# Altium integrated library Ali-padash.IntLib: 1012 symbols (part 5 of 5)

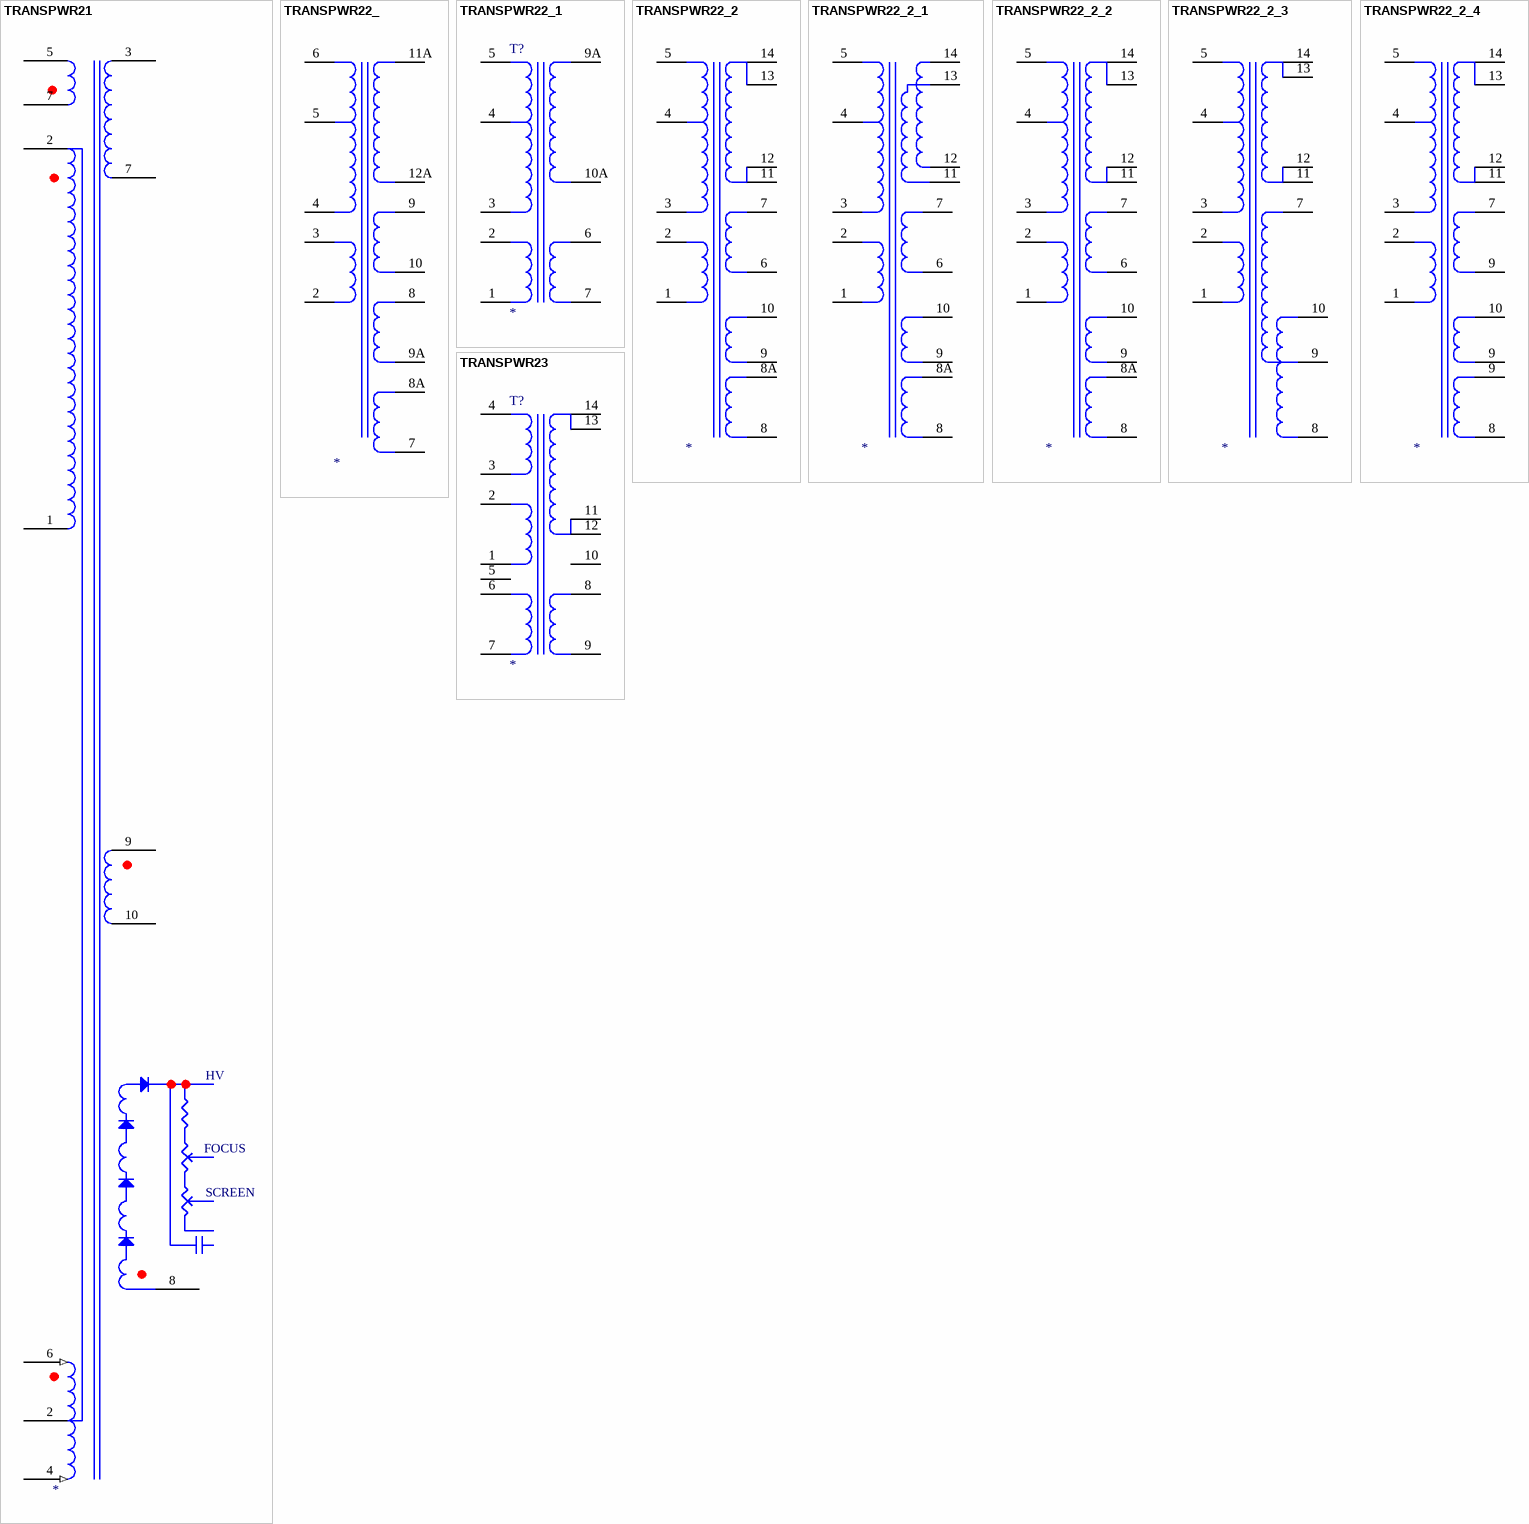
[diagram p72: symbols TRANSPWR21 to TRANSPWR23]

## TRANSPWR21
designator ?
pins: 1, 2, 2, 3, 4 (in), 5, 6 (in), 7, 7, 8, 9, 10
text: HV; FOCUS; SCREEN

## TRANSPWR22_
designator ?
pins: 2, 3, 4, 5 0, 6, 7, 8, 8A, 9, 9A, 10, 11A, 12A

## TRANSPWR22_1
designator T?
footprint EI3026B
pins: 1, 2, 3, 4, 5, 6, 7, 9A, 10A

## TRANSPWR22_2
designator ?
pins: 1, 2, 3, 4 0, 5, 6, 7, 8, 8A, 9, 10, 11, 12, 13, 14

## TRANSPWR22_2_1
designator ?
pins: 1, 2, 3, 4 0, 5, 6, 7, 8, 8A, 9, 10, 11, 12, 13, 14

## TRANSPWR22_2_2
designator ?
pins: 1, 2, 3, 4 0, 5, 6, 7, 8, 8A, 9, 10, 11, 12, 13, 14

## TRANSPWR22_2_3
designator ?
pins: 1, 2, 3, 4 0, 5, 7, 8, 9, 10, 11, 12, 13, 14

## TRANSPWR22_2_4
designator ?
pins: 1, 2, 3, 4 0, 5, 7, 8, 9, 9, 9, 10, 11, 12, 13, 14

## TRANSPWR23
designator T?
footprint TRANSPWR2
pins: 1, 2, 3 0, 4, 5, 6, 7, 8, 9, 10, 11, 12, 13, 14

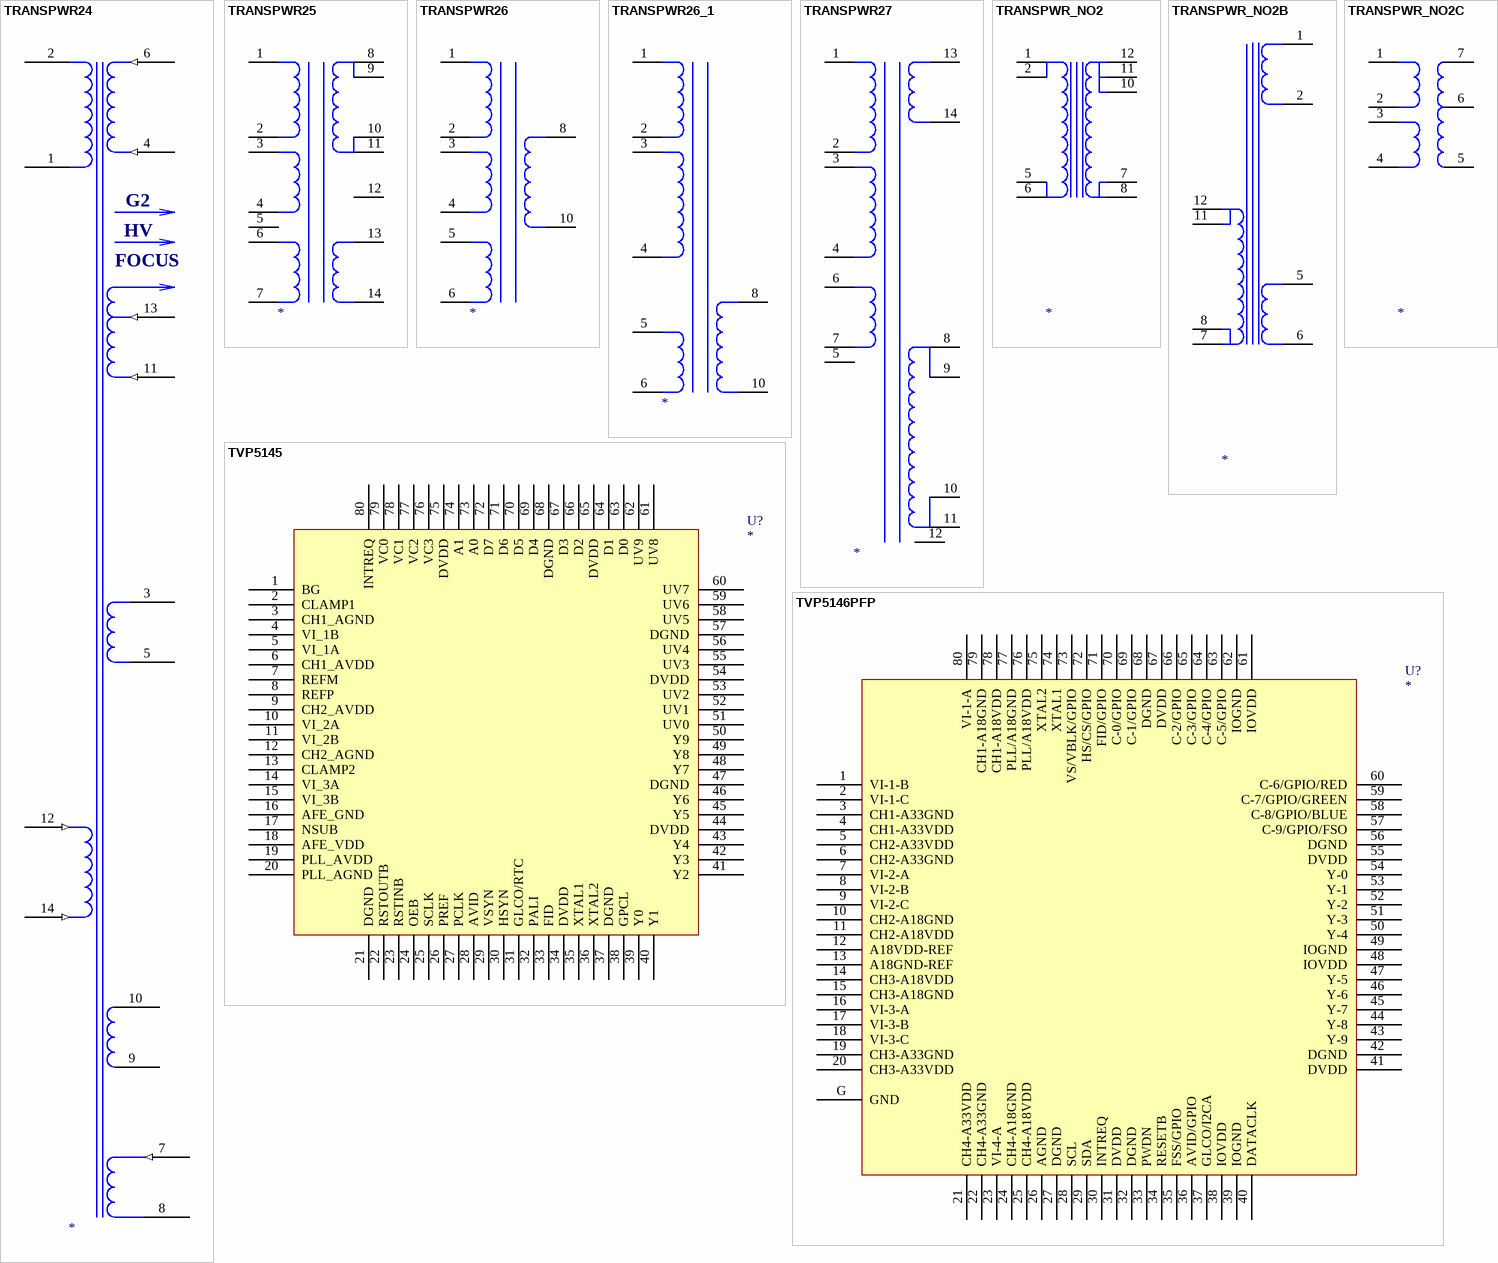
[diagram p73: symbols TRANSPWR24 to TVP5146PFP]

## TRANSPWR24
designator ?
pins: 1, 2, 3, 4 (in), 5, 6 (in), 7 (in), 8, 9, 10, 11 (in), 12 (in), 13 (in), 14 (in)
text: G2; HV; FOCUS

## TRANSPWR25
designator ?
pins: 1, 2, 3 0, 4, 5, 6, 7, 8, 9, 10, 11, 12, 13, 14

## TRANSPWR26
designator ?
pins: 1, 2, 3 0, 4, 5, 6, 8, 10

## TRANSPWR26_1
designator ?
pins: 1, 2, 3 0, 4, 5, 6, 8, 10

## TRANSPWR27
designator ?
pins: 1, 2, 3 0, 4, 5, 6, 7, 8, 9, 10, 11, 12, 13, 14

## TRANSPWR_NO2
designator ?
pins: 1, 2, 5, 6, 7, 8, 10, 11, 12

## TRANSPWR_NO2B
designator ?
pins: 1, 2, 5, 6, 7, 8, 11, 12

## TRANSPWR_NO2C
designator ?
pins: 1, 2, 3, 4, 5, 6, 7

## TVP5145
designator U?
footprint PQFP-G80
pins: 1 BG, 2 CLAMP1, 3 CH1_AGND, 4 VI_1B, 5 VI_1A, 6 CH1_AVDD, 7 REFM, 8 REFP, 9 CH2_AVDD, 10 VI_2A, 11 VI_2B, 12 CH2_AGND, 13 CLAMP2, 14 VI_3A, 15 VI_3B, 16 AFE_GND, 17 NSUB, 18 AFE_VDD, 19 PLL_AVDD, 20 PLL_AGND, 21 DGND, 22 RSTOUTB, 23 RSTINB, 24 OEB, 25 SCLK, 26 PREF, 27 PCLK, 28 AVID, 29 VSYN, 30 HSYN, 31 GLCO/RTC, 32 PALI, 33 FID, 34 DVDD, 35 XTAL1, 36 XTAL2, 37 DGND, 38 GPCL, 39 Y0, 40 Y1, 41 Y2, 42 Y3, 43 Y4, 44 DVDD, 45 Y5, 46 Y6, 47 DGND, 48 Y7, 49 Y8, 50 Y9, 51 UV0, 52 UV1, 53 UV2, 54 DVDD, 55 UV3, 56 UV4, 57 DGND, 58 UV5, 59 UV6, 60 UV7, 61 UV8, 62 UV9, 63 D0, 64 D1, 65 DVDD, 66 D2, 67 D3, 68 DGND, 69 D4, 70 D5, 71 D6, 72 D7, 73 A0, 74 A1, 75 DVDD, 76 VC3, 77 VC2, 78 VC1, 79 VC0, 80 INTREQ

## TVP5146PFP
designator U?
footprint PQFP-G80
pins: 1 VI-1-B, 2 VI-1-C, 3 CH1-A33GND, 4 CH1-A33VDD, 5 CH2-A33VDD, 6 CH2-A33GND, 7 VI-2-A, 8 VI-2-B, 9 VI-2-C, 10 CH2-A18GND, 11 CH2-A18VDD, 12 A18VDD-REF, 13 A18GND-REF, 14 CH3-A18VDD, 15 CH3-A18GND, 16 VI-3-A, 17 VI-3-B, 18 VI-3-C, 19 CH3-A33GND, 20 CH3-A33VDD, 21 CH4-A33VDD, 22 CH4-A33GND, 23 VI-4-A, 24 CH4-A18GND, 25 CH4-A18VDD, 26 AGND, 27 DGND, 28 SCL, 29 SDA, 30 INTREQ, 31 DVDD, 32 DGND, 33 PWDN, 34 RESETB, 35 FSS/GPIO, 36 AVID/GPIO, 37 GLCO/I2CA, 38 IOVDD, 39 IOGND, 40 DATACLK, 41 DVDD, 42 DGND, 43 Y-9, 44 Y-8, 45 Y-7, 46 Y-6, 47 Y-5, 48 IOVDD, 49 IOGND, 50 Y-4, 51 Y-3, 52 Y-2, 53 Y-1, 54 Y-0, 55 DVDD, 56 DGND, 57 C-9/GPIO/FSO, 58 C-8/GPIO/BLUE, 59 C-7/GPIO/GREEN, 60 C-6/GPIO/RED, 61 IOVDD, 62 IOGND, 63 C-5/GPIO, 64 C-4/GPIO, 65 C-3/GPIO, 66 C-2/GPIO, 67 DVDD, 68 DGND, 69 C-1/GPIO, 70 C-0/GPIO, 71 FID/GPIO, 72 HS/CS/GPIO, 73 VS/VBLK/GPIO, 74 XTAL1, 75 XTAL2, 76 PLL/A18VDD, 77 PLL/A18GND, 78 CH1-A18VDD, 79 CH1-A18GND, 80 VI-1-A, G GND

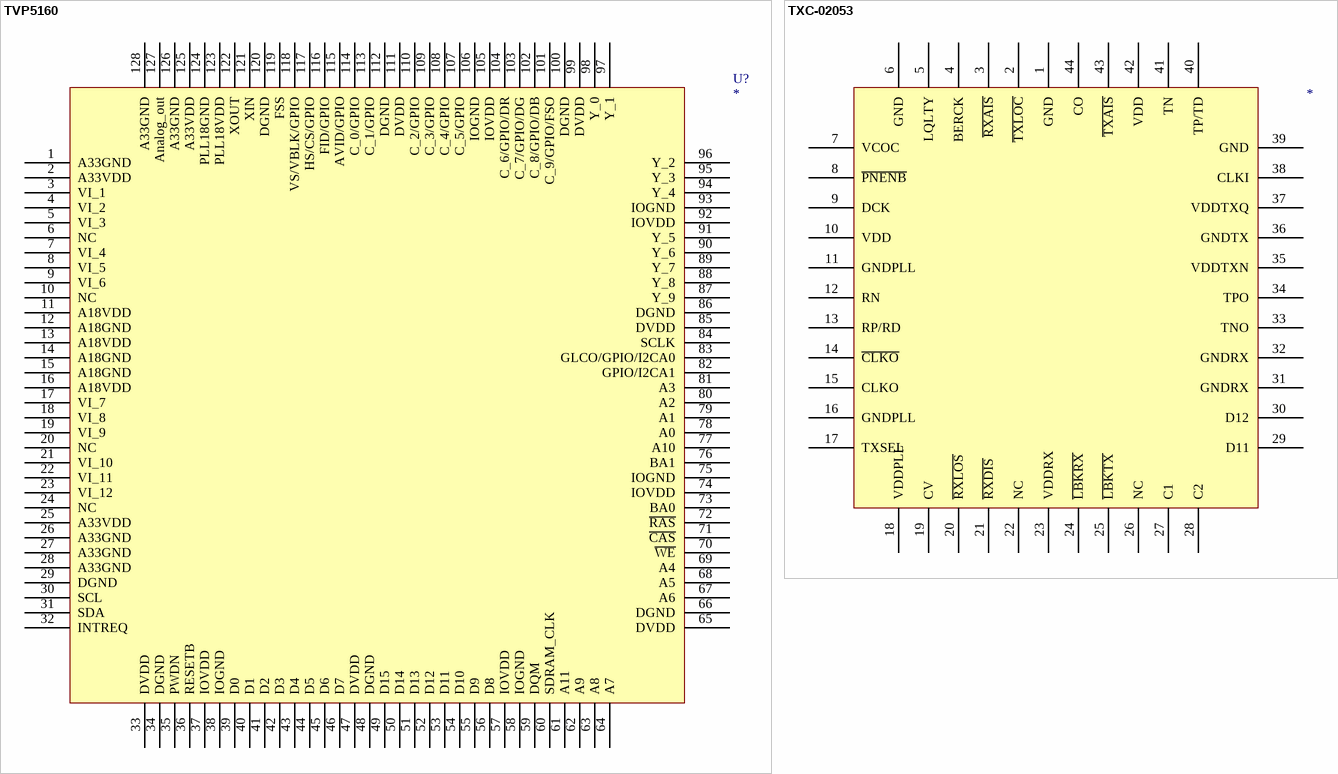
[diagram p74: symbols TVP5160 to TXC-02053]

## TVP5160
designator U?
footprint S-PQFP-G128
pins: 1 A33GND, 2 A33VDD, 3 VI_1, 4 VI_2, 5 VI_3, 6 NC, 7 VI_4, 8 VI_5, 9 VI_6, 10 NC, 11 A18VDD, 12 A18GND, 13 A18VDD, 14 A18GND, 15 A18GND, 16 A18VDD, 17 VI_7, 18 VI_8, 19 VI_9, 20 NC, 21 VI_10, 22 VI_11, 23 VI_12, 24 NC, 25 A33VDD, 26 A33GND, 27 A33GND, 28 A33GND, 29 DGND, 30 SCL, 31 SDA, 32 INTREQ, 33 DVDD, 34 DGND, 35 PWDN, 36 RESETB, 37 IOVDD, 38 IOGND, 39 D0, 40 D1, 41 D2, 42 D3, 43 D4, 44 D5, 45 D6, 46 D7, 47 DVDD, 48 DGND, 49 D15, 50 D14, 51 D13, 52 D12, 53 D11, 54 D10, 55 D9, 56 D8, 57 IOVDD, 58 IOGND, 59 DQM, 60 SDRAM_CLK, 61 A11, 62 A9, 63 A8, 64 A7, 65 DVDD, 66 DGND, 67 A6, 68 A5, 69 A4, 70 ~{WE}, 71 ~{CAS}, 72 ~{RAS}, 73 BA0, 74 IOVDD, 75 IOGND, 76 BA1, 77 A10, 78 A0, 79 A1, 80 A2, 81 A3, 82 GPIO/I2CA1, 83 GLCO/GPIO/I2CA0, 84 SCLK, 85 DVDD, 86 DGND, 87 Y_9, 88 Y_8, 89 Y_7, 90 Y_6, 91 Y_5, 92 IOVDD, 93 IOGND, 94 Y_4, 95 Y_3, 96 Y_2, 97 Y_1, 98 Y_0, 99 DVDD, 100 DGND, 101 C_9/GPIO/FSO, 102 C_8/GPIO/DB, 103 C_7/GPIO/DG, 104 C_6/GPIO/DR, 105 IOVDD, 106 IOGND, 107 C_5/GPIO, 108 C_4/GPIO, 109 C_3/GPIO, 110 C_2/GPIO, 111 DVDD, 112 DGND, 113 C_1/GPIO, 114 C_0/GPIO, 115 AVID/GPIO, 116 FID/GPIO, 117 HS/CS/GPIO, 118 VS/VBLK/GPIO, 119 FSS, 120 DGND, 121 XIN, 122 XOUT, 123 PLL18VDD, 124 PLL18GND, 125 A33VDD, 126 A33GND, 127 Analog_out, 128 A33GND

## TXC-02053
designator ?
U?
pins: 1 GND, 2 ~{TXLOC}, 3 ~{RXAIS}, 4 BERCK, 5 LQLTY, 6 GND, 7 VCOC, 8 ~{PNENB}, 9 DCK, 10 VDD, 11 GNDPLL, 12 RN, 13 RP/RD, 14 ~{CLKO}, 15 CLKO, 16 GNDPLL, 17 TXSEL, 18 VDDPLL, 19 CV, 20 ~{RXLOS}, 21 ~{RXDIS}, 22 NC, 23 VDDRX, 24 ~{LBKRX}, 25 ~{LBKTX}, 26 NC, 27 C1, 28 C2, 29 D11, 30 D12, 31 GNDRX, 32 GNDRX, 33 TNO, 34 TPO, 35 VDDTXN, 36 GNDTX, 37 VDDTXQ, 38 CLKI, 39 GND, 40 TP/TD, 41 TN, 42 VDD, 43 ~{TXAIS}, 44 CO

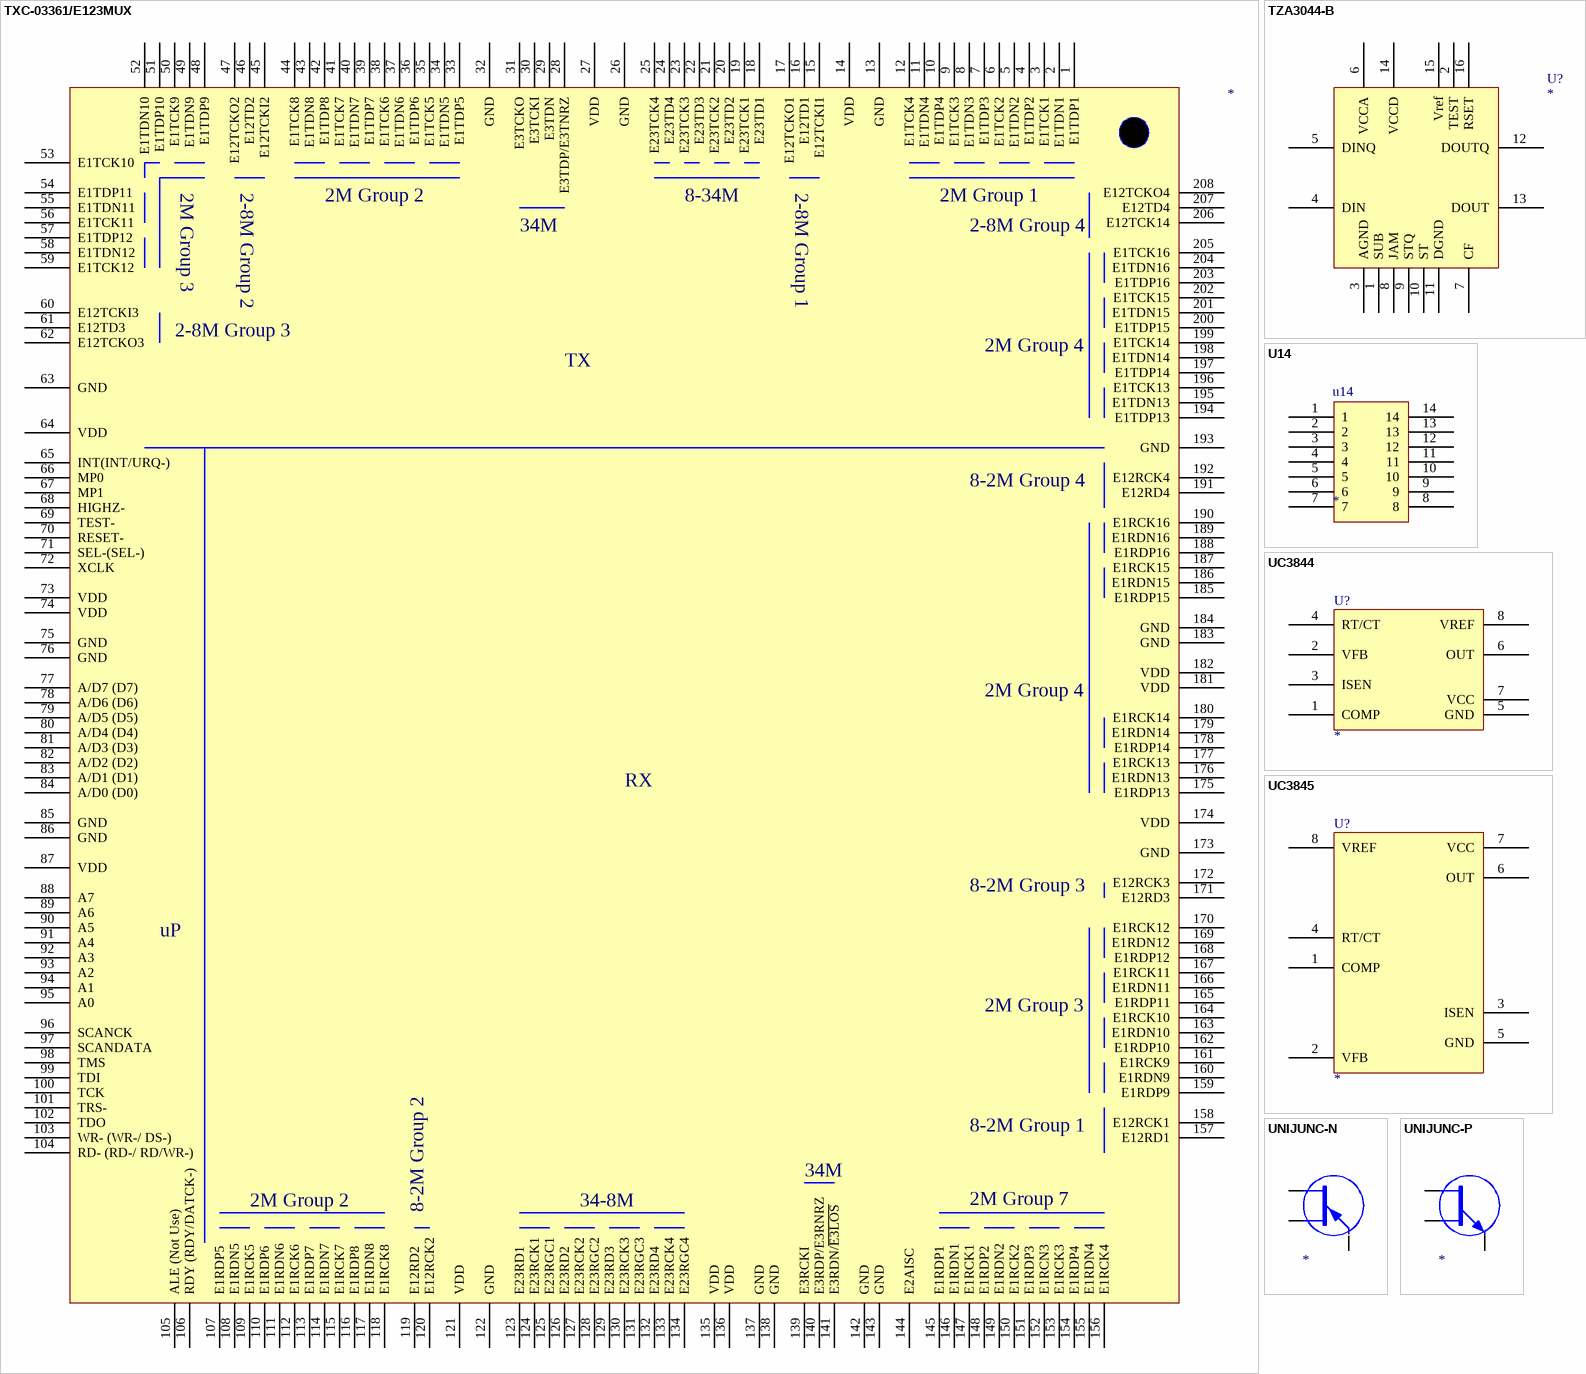
[diagram p75: symbols TXC-03361/E123MUX to UNIJUNC-P]

## TXC-03361/E123MUX
designator ?
U?
pins: 1 E1TDP1, 2 E1TDN1, 3 E1TCK1, 4 E1TDP2, 5 E1TDN2, 6 E1TCK2, 7 E1TDP3, 8 E1TDN3, 9 E1TCK3, 10 E1TDP4, 11 E1TDN4, 12 E1TCK4, 13 GND (power), 14 VDD (power), 15 E12TCKI1, 16 E12TD1, 17 E12TCKO1, 18 E23TD1, 19 E23TCK1, 20 E23TD2, 21 E23TCK2, 22 E23TD3, 23 E23TCK3, 24 E23TD4, 25 E23TCK4, 26 GND (power), 27 VDD (power), 28 E3TDP/E3TNRZ, 29 E3TDN, 30 E3TCKI, 31 E3TCKO, 32 GND (power), 33 E1TDP5, 34 E1TDN5, 35 E1TCK5, 36 E1TDP6, 37 E1TDN6, 38 E1TCK6, 39 E1TDP7, 40 E1TDN7, 41 E1TCK7, 42 E1TDP8, 43 E1TDN8, 44 E1TCK8, 45 E12TCKI2, 46 E12TD2, 47 E12TCKO2, 48 E1TDP9, 49 E1TDN9, 50 E1TCK9, 51 E1TDP10, 52 E1TDN10, 53 E1TCK10, 54 E1TDP11, 55 E1TDN11, 56 E1TCK11, 57 E1TDP12, 58 E1TDN12, 59 E1TCK12, 60 E12TCKI3, 61 E12TD3, 62 E12TCKO3, 63 GND (power), 64 VDD (power), 65 INT(INT/URQ-), 66 MP0, 67 MP1, 68 HIGHZ-, 69 TEST-, 70 RESET-, 71 SEL-(SEL-), 72 XCLK, 73 VDD (power), 74 VDD (power), 75 GND (power), 76 GND (power), 77 A/D7 (D7), 78 A/D6 (D6), 79 A/D5 (D5), 80 A/D4 (D4), 81 A/D3 (D3), 82 A/D2 (D2), 83 A/D1 (D1), 84 A/D0 (D0), 85 GND (power), 86 GND (power), 87 VDD (power), 88 A7, 89 A6, 90 A5, 91 A4, 92 A3, 93 A2, 94 A1, 95 A0, 96 SCANCK, 97 SCANDATA, 98 TMS, 99 TDI, 100 TCK, 101 TRS-, 102 TDO, 103 WR- (WR-/ DS-), 104 RD- (RD-/ RD/WR-), 105 ALE (Not Use), 106 RDY (RDY/DATCK-), 107 E1RDP5, 108 E1RDN5, 109 E1RCK5, 110 E1RDP6, 111 E1RDN6, 112 E1RCK6, 113 E1RDP7, 114 E1RDN7, 115 E1RCK7, 116 E1RDP8, 117 E1RDN8, 118 E1RCK8, 119 E12RD2, 120 E12RCK2, 121 VDD (power), 122 GND (power), 123 E23RD1, 124 E23RCK1, 125 E23RGC1, 126 E23RD2, 127 E23RCK2, 128 E23RGC2, 129 E23RD3, 130 E23RCK3, 131 E23RGC3, 132 E23RD4, 133 E23RCK4, 134 E23RGC4, 135 VDD (power), 136 VDD (power), 137 GND (power), 138 GND (power), 139 E3RCKI, 140 E3RDP/E3RNRZ, 141 E3RDN/~{E3LOS}, 142 GND (power), 143 GND (power), 144 E2AISC, 145 E1RDP1, 146 E1RDN1, 147 E1RCK1, 148 E1RDP2, 149 E1RDN2, 150 E1RCK2, 151 E1RDP3, 152 E1RCN3, 153 E1RCK3, 154 E1RDP4, 155 E1RDN4, 156 E1RCK4, 157 E12RD1, 158 E12RCK1, 159 E1RDP9, 160 E1RDN9, 161 E1RCK9, 162 E1RDP10, 163 E1RDN10, 164 E1RCK10, 165 E1RDP11, 166 E1RDN11, 167 E1RCK11, 168 E1RDP12, 169 E1RDN12, 170 E1RCK12, 171 E12RD3, 172 E12RCK3, 173 GND (power), 174 VDD (power), 175 E1RDP13, 176 E1RDN13, 177 E1RCK13, 178 E1RDP14, 179 E1RDN14, 180 E1RCK14, 181 VDD (power), 182 VDD (power), 183 GND (power), 184 GND (power), 185 E1RDP15, 186 E1RDN15, 187 E1RCK15, 188 E1RDP16, 189 E1RDN16, 190 E1RCK16, 191 E12RD4, 192 E12RCK4, 193 GND (power), 194 E1TDP13, 195 E1TDN13, 196 E1TCK13, 197 E1TDP14, 198 E1TDN14, 199 E1TCK14, 200 E1TDP15, 201 E1TDN15, 202 E1TCK15, 203 E1TDP16, 204 E1TDN16, 205 E1TCK16, 206 E12TCK14, 207 E12TD4, 208 E12TCKO4
text: 2M Group 3; 2-8M Group 2; 2-8M Group 1; 2M Group 2; 8-34M; 2M Group 1; 34M; 2-8M Group 4; 2-8M Group 3; 2M Group 4; TX; 8-2M Group 4; RX; 8-2M Group 3; uP; 8-2M Group 1; 8-2M Group 2; 34-8M; 2M Group 7

## TZA3044-B
designator U?
footprint SO-16
pins: 1 SUB, 2 TEST, 3 AGND, 4 DIN, 5 DINQ, 6 VCCA, 7 CF, 8 JAM, 9 STQ, 10 ST, 11 DGND, 12 DOUTQ, 13 DOUT, 14 VCCD, 15 Vref, 16 RSET

## U14
designator u14
pins: 1, 2, 3, 4, 5, 6, 7, 8, 9, 10, 11, 12, 13, 14

## UC3844
designator U?
pins: 1 COMP, 2 VFB, 3 ISEN, 4 RT/CT, 5 GND (power), 6 OUT, 7 VCC (power), 8 VREF

## UC3845
designator U?
pins: 1 COMP, 2 VFB, 3 ISEN, 4 RT/CT, 5 GND (power), 6 OUT, 7 VCC (power), 8 VREF

## UNIJUNC-N
designator ?
pins: 1, 2, 3

## UNIJUNC-P
designator ?
pins: 1, 2, 3

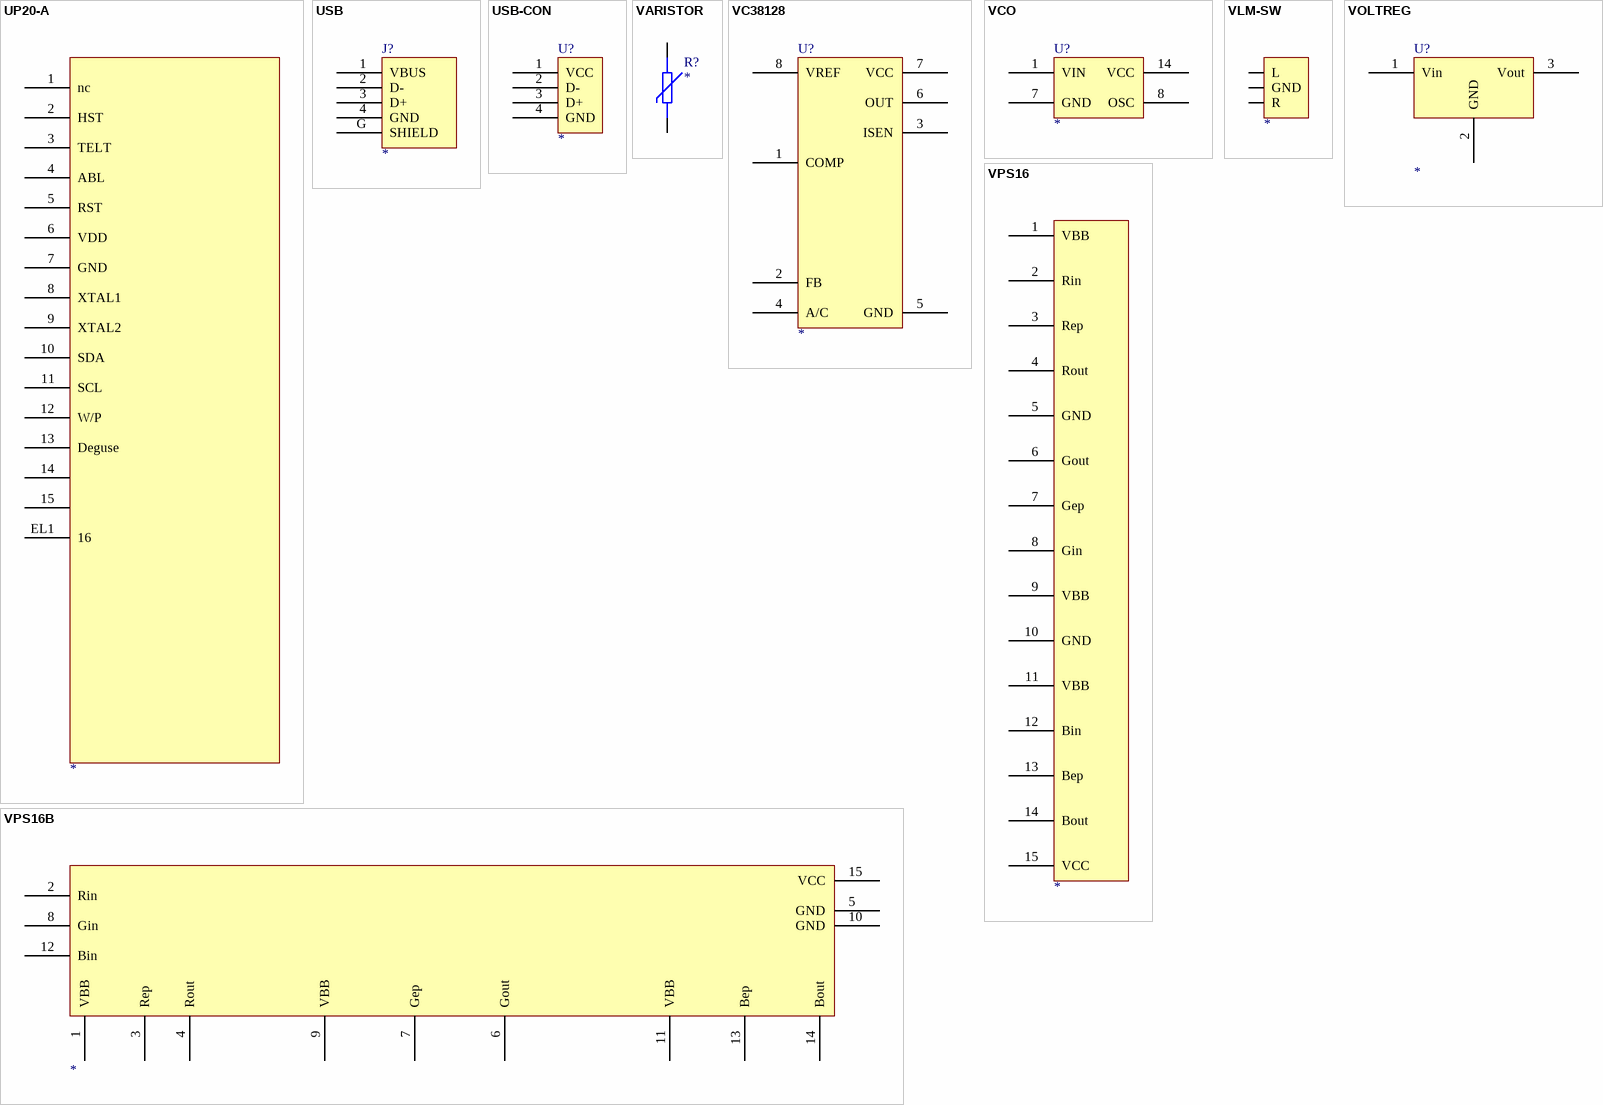
[diagram p76: symbols UP20-A to VPS16B]

## UP20-A
designator ?
pins: 1 nc, 2 HST, 3 TELT, 4 ABL, 5 RST, 6 VDD, 7 GND, 8 XTAL1, 9 XTAL2, 10 SDA, 11 SCL, 12 W/P, 13 Deguse, 14, 15, EL1 16

## USB
designator J?
footprint USB-F-RA
footprint USB1
footprint USB-M-RA
pins: 1 VBUS, 2 D-, 3 D+, 4 GND, G SHIELD

## USB-CON
designator U?
footprint USB-CON
pins: 1 VCC, 2 D-, 3 D+, 4 GND

## VARISTOR
designator R?
pins: 1, 2

## VC38128
designator U?
pins: 1 COMP, 2 FB, 3 ISEN, 4 A/C, 5 GND, 6 OUT, 7 VCC, 8 VREF

## VCO
designator U?
footprint VCXO-1
pins: 1 VIN, 7 GND, 8 OSC, 14 VCC

## VLM-SW
designator ?
pins: G GND, L, R

## VOLTREG
designator U?
footprint TO-220
pins: 1 Vin, 2 GND, 3 Vout

## VPS16
designator ?
pins: 1 VBB, 2 Rin, 3 Rep, 4 Rout, 5 GND, 6 Gout, 7 Gep, 8 Gin, 9 VBB, 10 GND, 11 VBB, 12 Bin, 13 Bep, 14 Bout, 15 VCC

## VPS16B
designator ?
pins: 1 VBB, 2 Rin, 3 Rep, 4 Rout, 5 GND, 6 Gout, 7 Gep, 8 Gin, 9 VBB, 10 GND, 11 VBB, 12 Bin, 13 Bep, 14 Bout, 15 VCC

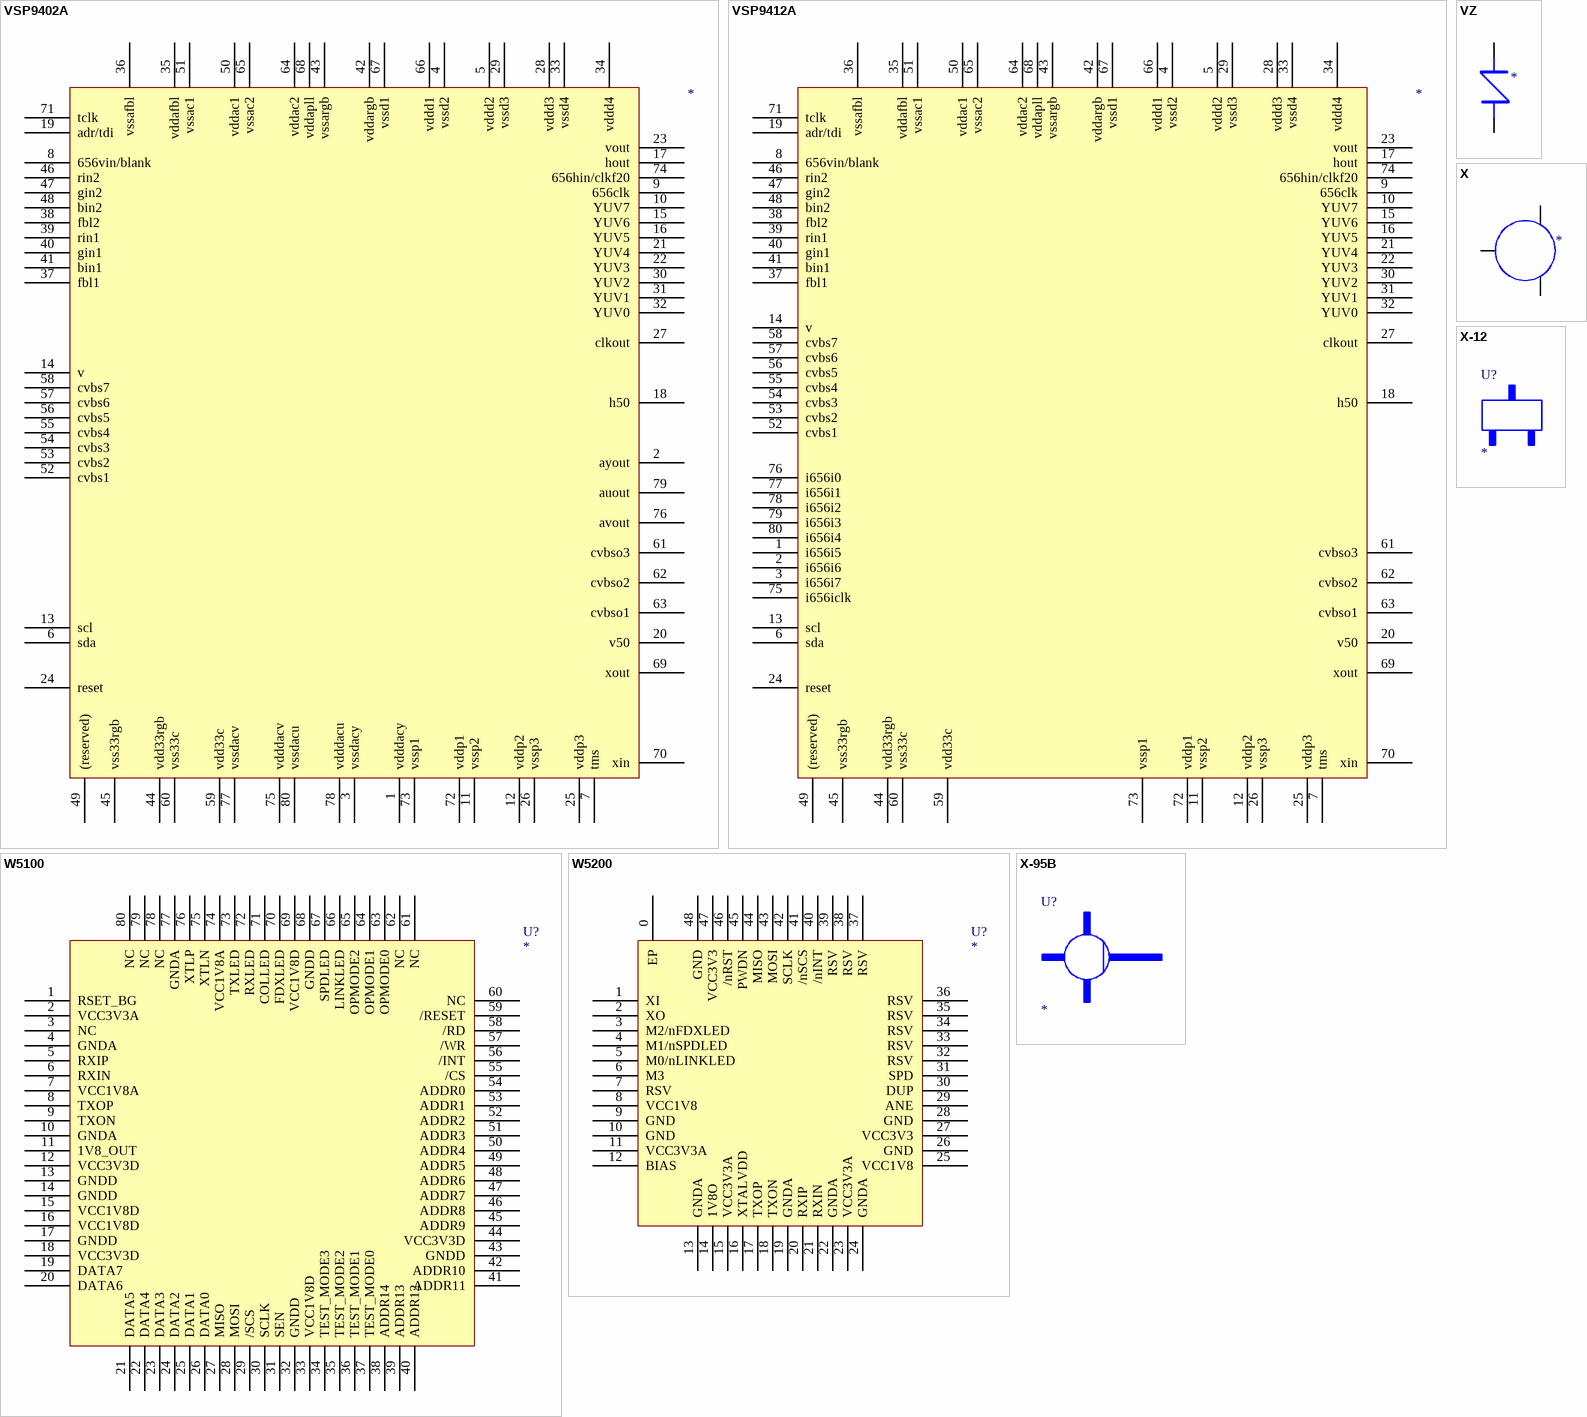
[diagram p77: symbols VSP9402A to X-95B]

## VSP9402A
designator ?
U?
footprint P-MQFP-80
pins: 1 vdddacy, 2 ayout, 3 vssdacy, 4 vssd2, 5 vddd2, 6 sda, 7 tms, 8 656vin/blank, 9 656clk, 10 YUV7, 11 vssp2, 12 vddp2, 13 scl, 14 v, 15 YUV6, 16 YUV5, 17 hout, 18 h50, 19 adr/tdi, 20 v50, 21 YUV4, 22 YUV3, 23 vout, 24 reset, 25 vddp3, 26 vssp3, 27 clkout, 28 vddd3, 29 vssd3, 30 YUV2, 31 YUV1, 32 YUV0, 33 vssd4, 34 vddd4, 35 vddafbl, 36 vssafbl, 37 fbl1, 38 fbl2, 39 rin1, 40 gin1, 41 bin1, 42 vddargb, 43 vssargb, 44 vdd33rgb, 45 vss33rgb, 46 rin2, 47 gin2, 48 bin2, 49 (reserved), 50 vddac1, 51 vssac1, 52 cvbs1, 53 cvbs2, 54 cvbs3, 55 cvbs4, 56 cvbs5, 57 cvbs6, 58 cvbs7, 59 vdd33c, 60 vss33c, 61 cvbso3, 62 cvbso2, 63 cvbso1, 64 vddac2, 65 vssac2, 66 vddd1, 67 vssd1, 68 vddapll, 69 xout, 70 xin, 71 tclk, 72 vddp1, 73 vssp1, 74 656hin/clkf20, 75 vdddacv, 76 avout, 77 vssdacv, 78 vdddacu, 79 auout, 80 vssdacu

## VSP9412A
designator ?
pins: 1 i656i5, 2 i656i6, 3 i656i7, 4 vssd2, 5 vddd2, 6 sda, 7 tms, 8 656vin/blank, 9 656clk, 10 YUV7, 11 vssp2, 12 vddp2, 13 scl, 14 v, 15 YUV6, 16 YUV5, 17 hout, 18 h50, 19 adr/tdi, 20 v50, 21 YUV4, 22 YUV3, 23 vout, 24 reset, 25 vddp3, 26 vssp3, 27 clkout, 28 vddd3, 29 vssd3, 30 YUV2, 31 YUV1, 32 YUV0, 33 vssd4, 34 vddd4, 35 vddafbl, 36 vssafbl, 37 fbl1, 38 fbl2, 39 rin1, 40 gin1, 41 bin1, 42 vddargb, 43 vssargb, 44 vdd33rgb, 45 vss33rgb, 46 rin2, 47 gin2, 48 bin2, 49 (reserved), 50 vddac1, 51 vssac1, 52 cvbs1, 53 cvbs2, 54 cvbs3, 55 cvbs4, 56 cvbs5, 57 cvbs6, 58 cvbs7, 59 vdd33c, 60 vss33c, 61 cvbso3, 62 cvbso2, 63 cvbso1, 64 vddac2, 65 vssac2, 66 vddd1, 67 vssd1, 68 vddapll, 69 xout, 70 xin, 71 tclk, 72 vddp1, 73 vssp1, 74 656hin/clkf20, 75 i656iclk, 76 i656i0, 77 i656i1, 78 i656i2, 79 i656i3, 80 i656i4

## VZ
designator ?
pins: A, K

## W5100
designator U?
footprint QFP80
pins: 1 RSET_BG, 2 VCC3V3A, 3 NC, 4 GNDA, 5 RXIP, 6 RXIN, 7 VCC1V8A, 8 TXOP, 9 TXON, 10 GNDA, 11 1V8_OUT, 12 VCC3V3D, 13 GNDD, 14 GNDD, 15 VCC1V8D, 16 VCC1V8D, 17 GNDD, 18 VCC3V3D, 19 DATA7, 20 DATA6, 21 DATA5, 22 DATA4, 23 DATA3, 24 DATA2, 25 DATA1, 26 DATA0, 27 MISO, 28 MOSI, 29 /SCS, 30 SCLK, 31 SEN, 32 GNDD, 33 VCC1V8D, 34 TEST_MODE3, 35 TEST_MODE2, 36 TEST_MODE1, 37 TEST_MODE0, 38 ADDR14, 39 ADDR13, 40 ADDR12, 41 ADDR11, 42 ADDR10, 43 GNDD, 44 VCC3V3D, 45 ADDR9, 46 ADDR8, 47 ADDR7, 48 ADDR6, 49 ADDR5, 50 ADDR4, 51 ADDR3, 52 ADDR2, 53 ADDR1, 54 ADDR0, 55 /CS, 56 /INT, 57 /WR, 58 /RD, 59 /RESET, 60 NC, 61 NC, 62 NC, 63 OPMODE0, 64 OPMODE1, 65 OPMODE2, 66 LINKLED, 67 SPDLED, 68 GNDD, 69 VCC1V8D, 70 FDXLED, 71 COLLED, 72 RXLED, 73 TXLED, 74 VCC1V8A, 75 XTLN, 76 XTLP, 77 GNDA, 78 NC, 79 NC, 80 NC

## W5200
designator U?
footprint QFN48
pins: 0 EP, 1 XI, 2 XO, 3 M2/nFDXLED, 4 M1/nSPDLED, 5 M0/nLINKLED, 6 M3, 7 RSV, 8 VCC1V8, 9 GND, 10 GND, 11 VCC3V3A, 12 BIAS, 13 GNDA, 14 1V8O, 15 VCC3V3A, 16 XTALVDD, 17 TXOP, 18 TXON, 19 GNDA, 20 RXIP, 21 RXIN, 22 GNDA, 23 VCC3V3A, 24 GNDA, 25 VCC1V8, 26 GND, 27 VCC3V3, 28 GND, 29 ANE, 30 DUP, 31 SPD, 32 RSV, 33 RSV, 34 RSV, 35 RSV, 36 RSV, 37 RSV, 38 RSV, 39 RSV, 40 /nINT, 41 /nSCS, 42 SCLK, 43 MOSI, 44 MISO, 45 PWDN, 46 /nRST, 47 VCC3V3, 48 GND

## X
designator ?
pins: B, C, E

## X-12
designator U?

## X-95B
designator U?

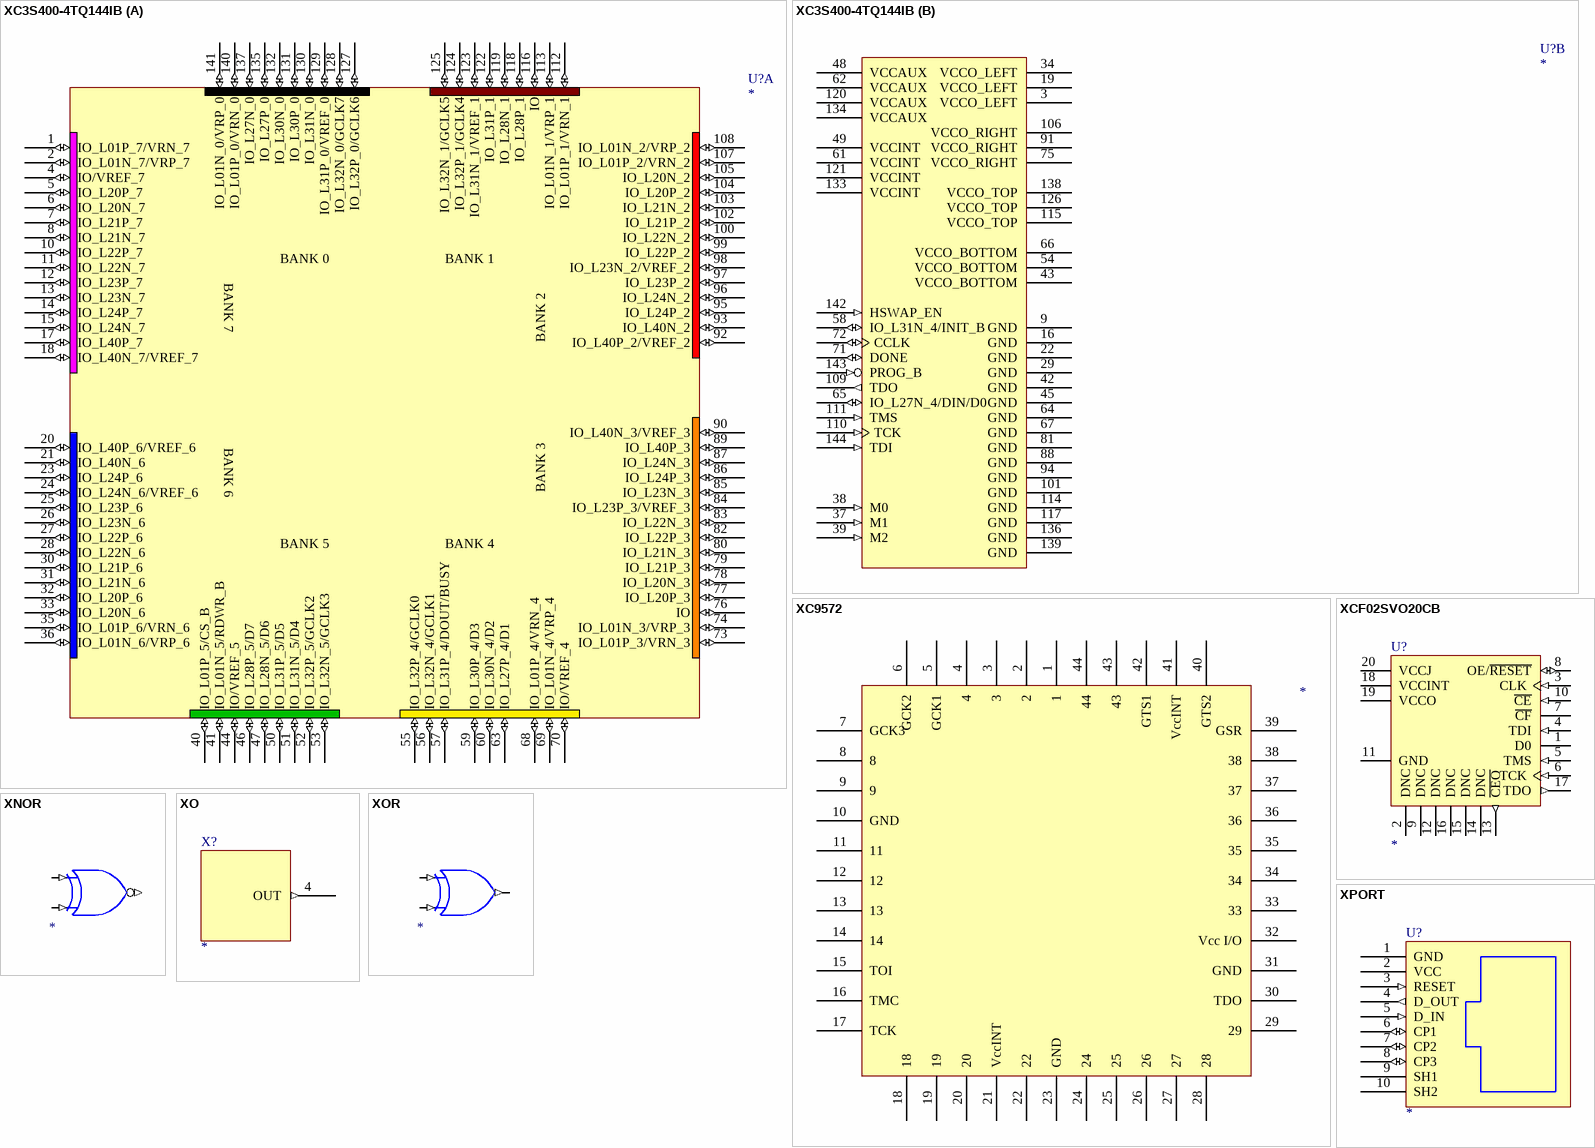
[diagram p78: symbols XC3S400-4TQ144IB to XPORT]

## XC3S400-4TQ144IB
designator U?
Spartan-3 1.2V FPGA, 97 User I/Os, 144-pin TQFP, Standard Performance, Industrial Grade; Published: *; DatasheetDocument: *; PackageDocument: *; PackageReference: *; Publisher: *; Code_JEDEC: *; Code_IPC: *
footprint TQ144
part A pins: 1 IO_L01P_7/VRN_7 (io), 2 IO_L01N_7/VRP_7 (io), 4 IO/VREF_7 (io), 5 IO_L20P_7 (io), 6 IO_L20N_7 (io), 7 IO_L21P_7 (io), 8 IO_L21N_7 (io), 10 IO_L22P_7 (io), 11 IO_L22N_7 (io), 12 IO_L23P_7 (io), 13 IO_L23N_7 (io), 14 IO_L24P_7 (io), 15 IO_L24N_7 (io), 17 IO_L40P_7 (io), 18 IO_L40N_7/VREF_7 (io), 20 IO_L40P_6/VREF_6 (io), 21 IO_L40N_6 (io), 23 IO_L24P_6 (io), 24 IO_L24N_6/VREF_6 (io), 25 IO_L23P_6 (io), 26 IO_L23N_6 (io), 27 IO_L22P_6 (io), 28 IO_L22N_6 (io), 30 IO_L21P_6 (io), 31 IO_L21N_6 (io), 32 IO_L20P_6 (io), 33 IO_L20N_6 (io), 35 IO_L01P_6/VRN_6 (io), 36 IO_L01N_6/VRP_6 (io), 40 IO_L01P_5/CS_B (io), 41 IO_L01N_5/RDWR_B (io), 44 IO/VREF_5 (io), 46 IO_L28P_5/D7 (io), 47 IO_L28N_5/D6 (io), 50 IO_L31P_5/D5 (io), 51 IO_L31N_5/D4 (io), 52 IO_L32P_5/GCLK2 (io), 53 IO_L32N_5/GCLK3 (io), 55 IO_L32P_4/GCLK0 (io), 56 IO_L32N_4/GCLK1 (io), 57 IO_L31P_4/DOUT/BUSY (io), 59 IO_L30P_4/D3 (io), 60 IO_L30N_4/D2 (io), 63 IO_L27P_4/D1 (io), 68 IO_L01P_4/VRN_4 (io), 69 IO_L01N_4/VRP_4 (io), 70 IO/VREF_4 (io), 73 IO_L01P_3/VRN_3 (io), 74 IO_L01N_3/VRP_3 (io), 76 IO (io), 77 IO_L20P_3 (io), 78 IO_L20N_3 (io), 79 IO_L21P_3 (io), 80 IO_L21N_3 (io), 82 IO_L22P_3 (io), 83 IO_L22N_3 (io), 84 IO_L23P_3/VREF_3 (io), 85 IO_L23N_3 (io), 86 IO_L24P_3 (io), 87 IO_L24N_3 (io), 89 IO_L40P_3 (io), 90 IO_L40N_3/VREF_3 (io), 92 IO_L40P_2/VREF_2 (io), 93 IO_L40N_2 (io), 95 IO_L24P_2 (io), 96 IO_L24N_2 (io), 97 IO_L23P_2 (io), 98 IO_L23N_2/VREF_2 (io), 99 IO_L22P_2 (io), 100 IO_L22N_2 (io), 102 IO_L21P_2 (io), 103 IO_L21N_2 (io), 104 IO_L20P_2 (io), 105 IO_L20N_2 (io), 107 IO_L01P_2/VRN_2 (io), 108 IO_L01N_2/VRP_2 (io), 112 IO_L01P_1/VRN_1 (io), 113 IO_L01N_1/VRP_1 (io), 116 IO (io), 118 IO_L28P_1 (io), 119 IO_L28N_1 (io), 122 IO_L31P_1 (io), 123 IO_L31N_1/VREF_1 (io), 124 IO_L32P_1/GCLK4 (io), 125 IO_L32N_1/GCLK5 (io), 127 IO_L32P_0/GCLK6 (io), 128 IO_L32N_0/GCLK7 (io), 129 IO_L31P_0/VREF_0 (io), 130 IO_L31N_0 (io), 131 IO_L30P_0 (io), 132 IO_L30N_0 (io), 135 IO_L27P_0 (io), 137 IO_L27N_0 (io), 140 IO_L01P_0/VRN_0 (io), 141 IO_L01N_0/VRP_0 (io)
part B pins: 3 VCCO_LEFT (power), 9 GND (power), 16 GND (power), 19 VCCO_LEFT (power), 22 GND (power), 29 GND (power), 34 VCCO_LEFT (power), 37 M1 (in), 38 M0 (in), 39 M2 (in), 42 GND (power), 43 VCCO_BOTTOM (power), 45 GND (power), 48 VCCAUX (power), 49 VCCINT (power), 54 VCCO_BOTTOM (power), 58 IO_L31N_4/INIT_B (io), 61 VCCINT (power), 62 VCCAUX (power), 64 GND (power), 65 IO_L27N_4/DIN/D0 (io), 66 VCCO_BOTTOM (power), 67 GND (power), 71 DONE (io), 72 CCLK (io), 75 VCCO_RIGHT (power), 81 GND (power), 88 GND (power), 91 VCCO_RIGHT (power), 94 GND (power), 101 GND (power), 106 VCCO_RIGHT (power), 109 TDO (out), 110 TCK (in), 111 TMS (in), 114 GND (power), 115 VCCO_TOP (power), 117 GND (power), 120 VCCAUX (power), 121 VCCINT (power), 126 VCCO_TOP (power), 133 VCCINT (power), 134 VCCAUX (power), 136 GND (power), 138 VCCO_TOP (power), 139 GND (power), 142 HSWAP_EN (in), 143 PROG_B (in), 144 TDI (in)
2 alternate drawings of the same symbol
part A text: BANK 0; BANK 1; BANK 7; BANK 2; BANK 6; BANK 3; BANK 5; BANK 4

## XC9572
designator ?
pins: 1, 2, 3, 4, 5 GCK1, 6 GCK2, 7 GCK3, 8, 9, 10 GND, 11, 12, 13, 14, 15 TOI, 16 TMC, 17 TCK, 18, 19, 20, 21 VccINT, 22, 23 GND, 24, 25, 26, 27, 28, 29, 30 TDO, 31 GND, 32 Vcc I/O, 33, 34, 35, 36, 37, 38, 39 GSR, 40 GTS2, 41 VccINT, 42 GTS1, 43, 44

## XCF02SVO20CB
designator U?
XCF00S Series, Platform Flash In-System Programmable Configuration 3.3V PROM, 20-Pin TSOP, 2-Megabit, Commercial Grade; Published: *; DatasheetDocument: *; PackageDocument: *; PackageReference: *; Publisher: *; Code_JEDEC: *
footprint VO20
pins: 1 D0 (hiz), 2 DNC, 3 CLK (in), 4 TDI (in), 5 TMS (in), 6 TCK (in), 7 ~{CF} (oc), 8 OE/~{RESET} (io), 9 DNC, 10 ~{CE} (in), 11 GND (power), 12 DNC, 13 ~{CEO} (out), 14 DNC, 15 DNC, 16 DNC, 17 TDO (out), 18 VCCINT (power), 19 VCCO (power), 20 VCCJ (power)
2 alternate drawings of the same symbol

## XNOR
designator ?
pins: 1 (in), 2 (in), 3 (out)

## XO
designator X?
pins: 4 OUT (out), 7 GND (power) hidden to GND, 14 VCC (power) hidden to VCC

## XOR
designator ?
pins: 1 (in), 2 (in), 3 (out)

## XPORT
designator U?
footprint XPORT
pins: 1 GND (power), 2 VCC (power), 3 RESET (in), 4 D_OUT (out), 5 D_IN (in), 6 CP1 (io), 7 CP2 (io), 8 CP3 (io), 9 SH1, 10 SH2

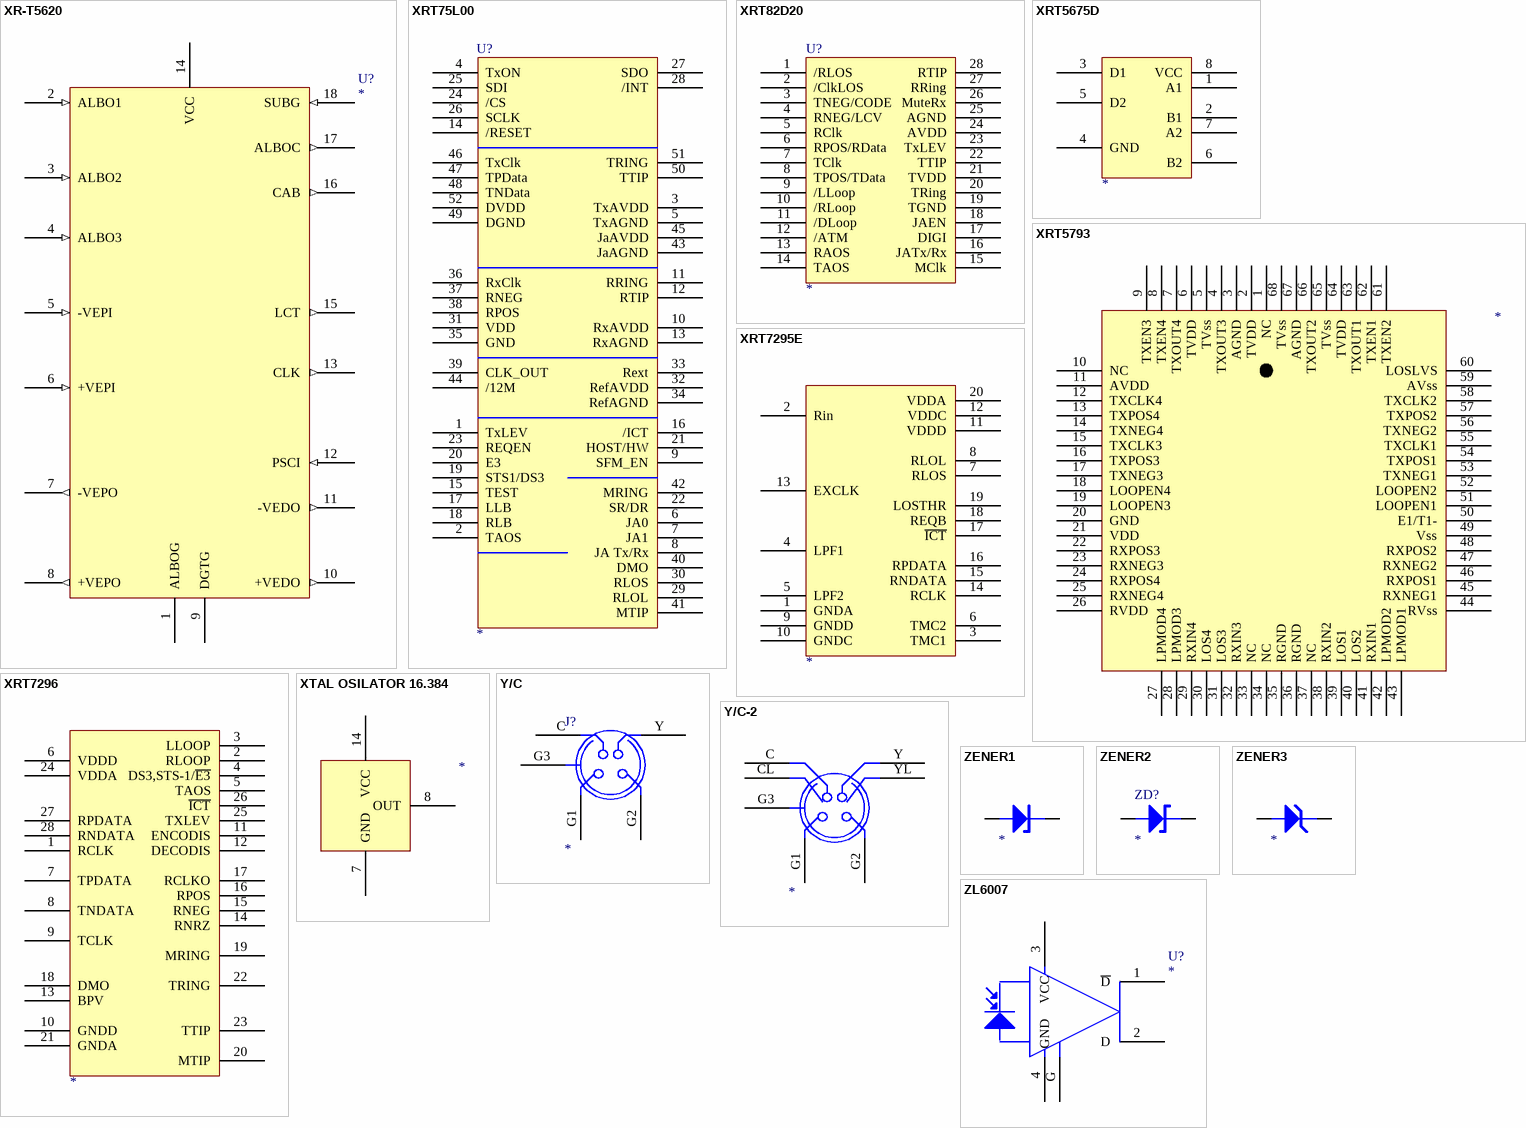
[diagram p79: symbols XR-T5620 to ZL6007]

## XR-T5620
designator U?
pins: 1 ALBOG, 2 ALBO1 (in), 3 ALBO2 (in), 4 ALBO3 (in), 5 -VEPI (in), 6 +VEPI (in), 7 -VEPO (out), 8 +VEPO (out), 9 DGTG, 10 +VEDO (out), 11 -VEDO (out), 12 PSCI (in), 13 CLK (out), 14 VCC, 15 LCT (out), 16 CAB (out), 17 ALBOC (out), 18 SUBG (in)

## XRT75L00
designator U?
footprint TQFP52
pins: 1 TxLEV, 2 TAOS, 3 TxAVDD, 4 TxON, 5 TxAGND, 6 JA0, 7 JA1, 8 JA Tx/Rx, 9 SFM_EN, 10 RxAVDD, 11 RRING, 12 RTIP, 13 RxAGND, 14 /RESET, 15 TEST, 16 /ICT, 17 LLB, 18 RLB, 19 STS1/DS3, 20 E3, 21 HOST/HW, 22 SR/DR, 23 REQEN, 24 /CS, 25 SDI, 26 SCLK, 27 SDO, 28 /INT, 29 RLOL, 30 RLOS, 31 VDD, 32 RefAVDD, 33 Rext, 34 RefAGND, 35 GND, 36 RxClk, 37 RNEG, 38 RPOS, 39 CLK_OUT, 40 DMO, 41 MTIP, 42 MRING, 43 JaAGND, 44 /12M, 45 JaAVDD, 46 TxClk, 47 TPData, 48 TNData, 49 DGND, 50 TTIP, 51 TRING, 52 DVDD

## XRT82D20
designator U?
footprint JEDEC-SOJ28
pins: 1 /RLOS, 2 /ClkLOS, 3 TNEG/CODE, 4 RNEG/LCV, 5 RClk, 6 RPOS/RData, 7 TClk, 8 TPOS/TData, 9 /LLoop, 10 /RLoop, 11 /DLoop, 12 /ATM, 13 RAOS, 14 TAOS, 15 MClk, 16 JATx/Rx, 17 DIGI, 18 JAEN, 19 TGND, 20 TRing, 21 TVDD, 22 TTIP, 23 TxLEV, 24 AVDD, 25 AGND, 26 MuteRx, 27 RRing, 28 RTIP

## XRT5675D
designator ?
U?
pins: 1 A1, 2 B1, 3 D1, 4 GND (power), 5 D2, 6 B2, 7 A2, 8 VCC (power)

## XRT5793
designator ?
pins: 1 NC, 2 TVDD (power), 3 AGND (power), 4 TXOUT3, 5 TVss (power), 6 TVDD (power), 7 TXOUT4, 8 TXEN4, 9 TXEN3, 10 NC, 11 AVDD (power), 12 TXCLK4, 13 TXPOS4, 14 TXNEG4, 15 TXCLK3, 16 TXPOS3, 17 TXNEG3, 18 LOOPEN4, 19 LOOPEN3, 20 GND (power), 21 VDD (power), 22 RXPOS3, 23 RXNEG3, 24 RXPOS4, 25 RXNEG4, 26 RVDD (power), 27 LPMOD4, 28 LPMOD3, 29 RXIN4, 30 LOS4, 31 LOS3, 32 RXIN3, 33 NC, 34 NC, 35 RGND (power), 36 RGND (power), 37 NC, 38 RXIN2, 39 LOS1, 40 LOS2, 41 RXIN1, 42 LPMOD2, 43 LPMOD1, 44 RVss (power), 45 RXNEG1, 46 RXPOS1, 47 RXNEG2, 48 RXPOS2, 49 Vss (power), 50 E1/T1-, 51 LOOPEN1, 52 LOOPEN2, 53 TXNEG1, 54 TXPOS1, 55 TXCLK1, 56 TXNEG2, 57 TXPOS2, 58 TXCLK2, 59 AVss (power), 60 LOSLVS, 61 TXEN2, 62 TXEN1, 63 TXOUT1, 64 TVDD (power), 65 TVss (power), 66 TXOUT2, 67 AGND (power), 68 TVss (power)

## XRT7295E
designator ?
U?
footprint SOJ-16
pins: 1 GNDA (power), 2 Rin, 3 TMC1, 4 LPF1, 5 LPF2, 6 TMC2, 7 RLOS, 8 RLOL, 9 GNDD (power), 10 GNDC (power), 11 VDDD (power), 12 VDDC (power), 13 EXCLK, 14 RCLK, 15 RNDATA, 16 RPDATA, 17 ~{ICT}, 18 REQB, 19 LOSTHR, 20 VDDA (power)

## XRT7296
designator ?
U?
footprint SOJ-28
pins: 1 RCLK, 2 RLOOP, 3 LLOOP, 4 DS3,STS-1/~{E3}, 5 TAOS, 6 VDDD, 7 TPDATA, 8 TNDATA, 9 TCLK, 10 GNDD, 11 ENCODIS, 12 DECODIS, 13 BPV, 14 RNRZ, 15 RNEG, 16 RPOS, 17 RCLKO, 18 DMO, 19 MRING, 20 MTIP, 21 GNDA, 22 TRING, 23 TTIP, 24 VDDA, 25 TXLEV, 26 ~{ICT}, 27 RPDATA, 28 RNDATA

## XTAL OSILATOR 16.384
designator ?
pins: 7 GND, 8 OUT, 14 VCC

## Y/C
designator J?
footprint Y/C
pins: C, G1, G2, G3, Y

## Y/C-2
designator ?
pins: C, CL, G1, G2, G3, Y, YL

## ZENER1
designator ?
pins: A, K

## ZENER2
designator ZD?
footprint DIODE0.3
footprint DIODE0.4
pins: A, K

## ZENER3
designator ?
pins: A, K

## ZL6007
designator U?
footprint LDHP2
pins: 1 ~{D}, 2 D, 3 VCC, 4 GND, G